# Altium footprint library Connectors.PcbLib: 228 footprints (part 12 of 15)
Each footprint in its own frame and in the unit in brackets; x right, y up, seen from the top. Pads: shape width x height; smd on the part's side, far side on the other; paste and mask are expansions set on the pad; w line width, h text height; cw(c..) or ccw(c..) is an arc to the next point about the centre after c.
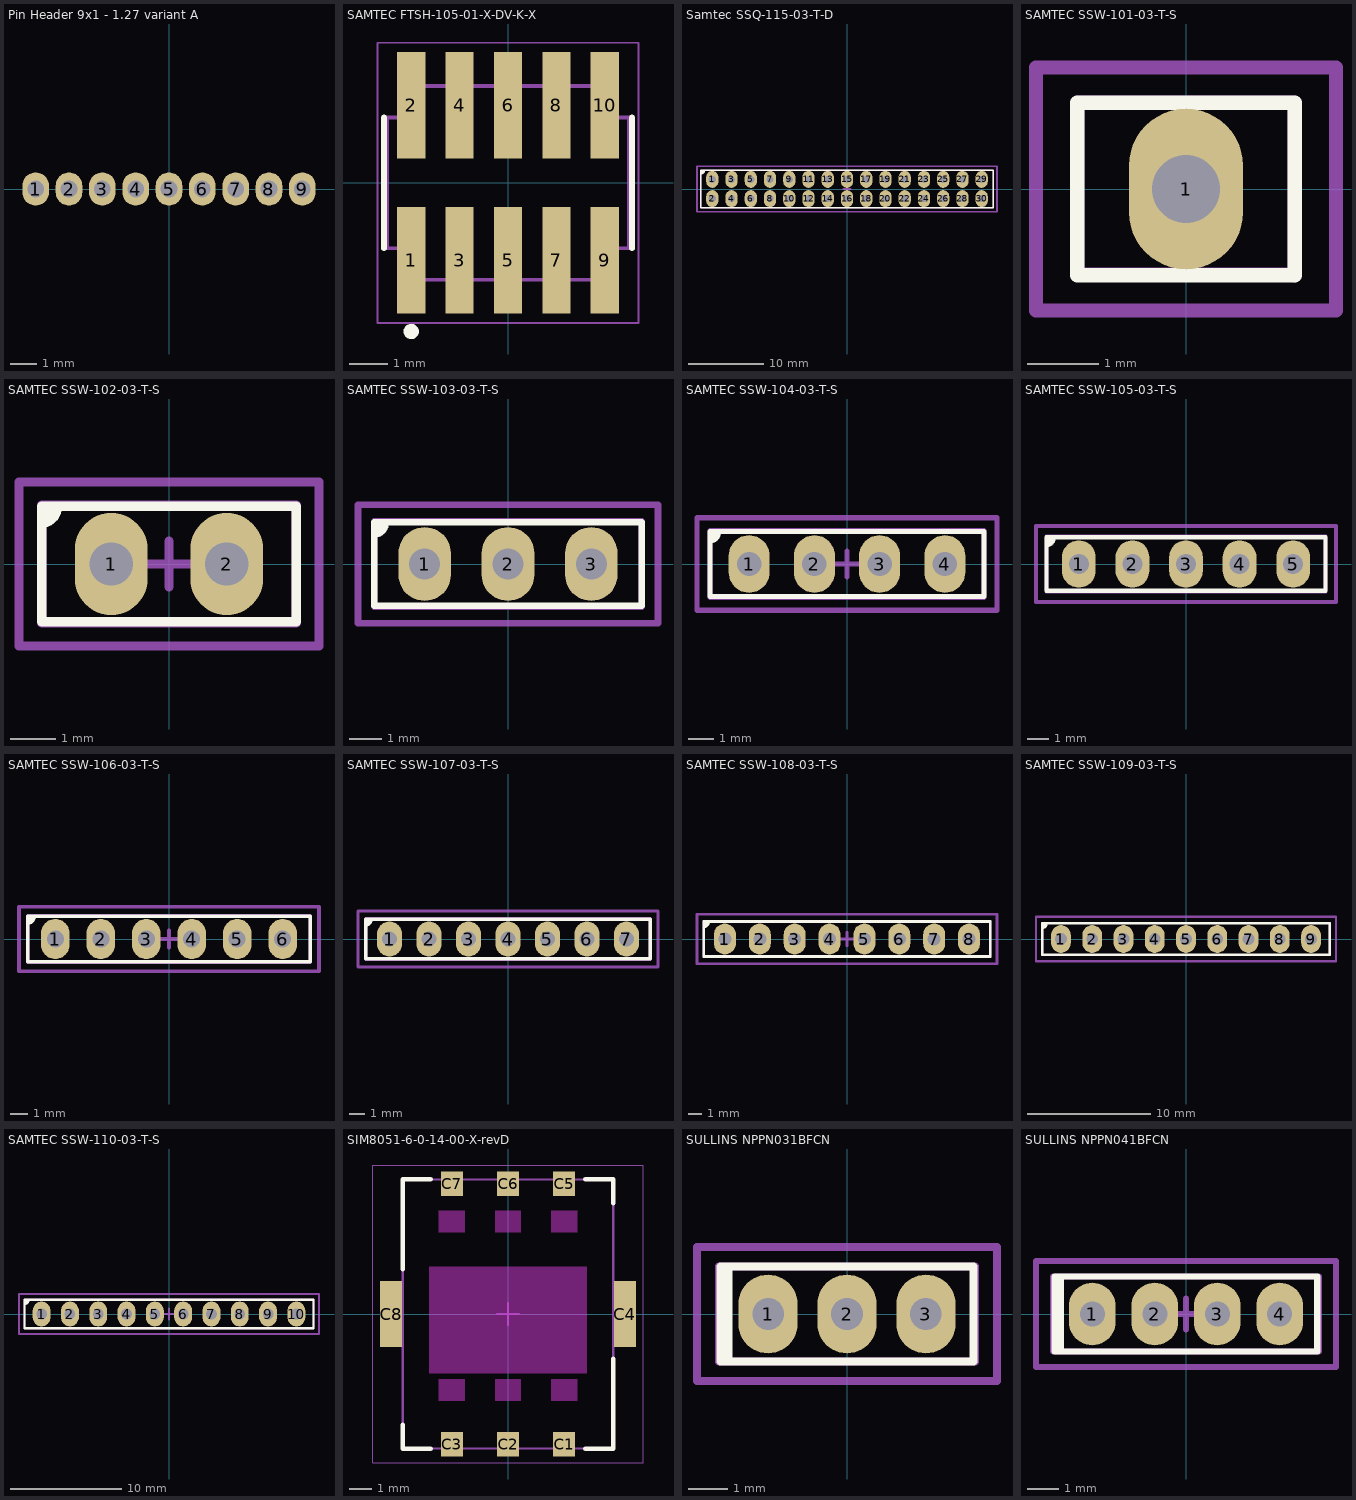
[diagram p11: the footprints below, top view; thin cyan lines are the x and y axes]

## Pin Header 9x1 - 1.27 variant A [mil]
height 425
pads (9):
  oval 40x50 hole 25 mask+0: 1(-200,0) 2(-150,0) 3(-100,0) 4(-50,0) 5(0,0) 6(50,0) 7(100,0) 8(150,0) 9(200,0)
Top Solder:
  circle w17.5: c-200,0 r8.75
  circle w17.5: c-150,0 r8.75
  circle w17.5: c-100,0 r8.75
  circle w17.5: c-50,0 r8.75
  circle w17.5: c0,0 r8.75
  circle w17.5: c50,0 r8.75
  circle w17.5: c100,0 r8.75
  circle w17.5: c150,0 r8.75
  circle w17.5: c200,0 r8.75

## SAMTEC FTSH-105-01-X-DV-K-X [mil]
pads (10):
  rect 29x110 smd paste+0 mask+4.02: 1(-100,-80) 2(-100,80) 3(-50,-80) 4(-50,80) 5(0,-80) 6(0,80) 7(50,-80) 8(50,80) 9(100,-80) 10(100,80)
Top Overlay:
  circle w7.87: c-100,-153.54 r3.94
  lines w5.91: -128.15,-67.5 -128.15,67.5 ; 128.15,-67.5 128.15,67.5
Top Component Outline:
  lines w3.94: -125,-67.5 -100,-67.5 -100,-100 100,-100 100,-67.5 125,-67.5 125,67.5 100,67.5 100,100 -100,100 -100,67.5 -125,67.5 -125,-67.5
Top Courtyard:
  lines w1.97: -134.84,-144.84 -134.84,144.84 134.84,144.84 134.84,-144.84 -134.84,-144.84
3D body "FTSH-105-01-L-DV-K.stp": height 225, standoff -16, extent -124.99,-114.99 125,115

## Samtec SSQ-115-03-T-D [mm]
height 8.51
pads (30):
  oval 1.6x2.25 hole 0.95: 1(-17.78,1.27) 2(-17.78,-1.27) 3(-15.24,1.27) 4(-15.24,-1.27) 5(-12.7,1.27) 6(-12.7,-1.27) 7(-10.16,1.27) 8(-10.16,-1.27) 9(-7.62,1.27) 10(-7.62,-1.27) 11(-5.08,1.27) 12(-5.08,-1.27) 13(-2.54,1.27) 14(-2.54,-1.27) 15(0,1.27) 16(0,-1.27) 17(2.54,1.27) 18(2.54,-1.27) 19(5.08,1.27) 20(5.08,-1.27) 21(7.62,1.27) 22(7.62,-1.27) 23(10.16,1.27) 24(10.16,-1.27) 25(12.7,1.27) 26(12.7,-1.27) 27(15.24,1.27) 28(15.24,-1.27) 29(17.78,1.27) 30(17.78,-1.27)
Top Overlay:
  region: -19.3,2.5 -18.8,2.5 -18.8,2.3 -19.1,2 -19.3,2
  lines w0.2: -19.3,2 ccw(c-19.3,2.5) -18.8,2.5 ; -19.3,-2.5 19.3,-2.5 19.3,2.5 -19.3,2.5 -19.3,-2.5
Top Component Outline:
  lines w0.2: -19.304,-2.476 -19.304,2.477 19.304,2.477 19.304,-2.476 -19.304,-2.476
Top Courtyard:
  lines w0.2: -0.5,0 0.5,0 ; 0,-0.5 0,0.5 ; -19.8,-3 -19.8,3 19.8,3 19.8,-3 -19.8,-3
3D body "Samtec SSQ-115-03-T-D.STEP": height 8.51, standoff -10.01, extent -19.304,-2.476 19.304,2.477

## SAMTEC SSW-101-03-T-S [mm]
height 8.51
pads (1):
  oval 1.6x2.25 hole 0.95: 1(0,0)
Top Overlay:
  lines w0.2: 1.524,-1.2 1.524,-1.206 ; 1.524,-1.206 1.524,1.207 -1.524,1.207 -1.524,-1.206 1.524,-1.206
Top Component Outline:
  lines w0.2: 1.524,-1.206 1.524,1.207 -1.524,1.207 -1.524,-1.2 1.524,-1.2
Top Courtyard:
  lines w0.2: -0.5,0 0.5,0 ; 0,-0.5 0,0.5 ; -2.1,-1.7 -2.1,1.7 2.1,1.7 2.1,-1.7 -2.1,-1.7
3D body "Samtec-SSW-101-03-T-S.STEP": height 8.51, standoff -10.01, extent -1.524,-1.206 1.524,1.207

## SAMTEC SSW-102-03-T-S [mm]
height 8.51
pads (2):
  oval 1.6x2.25 hole 0.95: 1(-1.27,0) 2(1.27,0)
Top Overlay:
  region: -2.8,1.27 -2.46,1.27 -2.46,1.1 -2.66,0.9 -2.8,0.9
  lines w0.2: -2.8,0.9 ccw(c-2.8,1.24) -2.46,1.24 -2.46,1.27 ; -2.8,-1.27 -2.8,1.27 2.8,1.27 2.8,-1.27 -2.8,-1.27
Top Component Outline:
  lines w0.2: -2.8,-1.3 2.8,-1.3 2.8,1.3 -2.8,1.3 -2.8,-1.3
Top Courtyard:
  lines w0.2: -0.5,0 0.5,0 ; 0,-0.5 0,0.5 ; -3.3,-1.8 -3.3,1.8 3.3,1.8 3.3,-1.8 -3.3,-1.8
3D body "Samtec-SSW-102-03-T-S.STEP": height 8.51, standoff -10.01, extent -2.794,-1.206 2.794,1.207

## SAMTEC SSW-103-03-T-S [mm]
height 8.51
pads (3):
  oval 1.6x2.25 hole 0.95: 1(-2.54,0) 2(0,0) 3(2.54,0)
Top Overlay:
  region: -4.07,1.27 -3.73,1.27 -3.73,1.1 -3.93,0.9 -4.07,0.9
  lines w0.2: -4.07,0.9 ccw(c-4.07,1.24) -3.73,1.24 -3.73,1.27 ; -4.07,-1.27 -4.07,1.27 4.07,1.27 4.07,-1.27 -4.07,-1.27
Top Component Outline:
  lines w0.2: -4.07,-1.3 4.07,-1.3 4.07,1.3 -4.07,1.3 -4.07,-1.3
Top Courtyard:
  lines w0.2: -0.5,0 0.5,0 ; 0,-0.5 0,0.5 ; -4.57,-1.8 -4.57,1.8 4.57,1.8 4.57,-1.8 -4.57,-1.8
3D body "Samtec-SSW-103-03-T-S.STEP": height 8.51, standoff -10.01, extent -4.064,-1.206 4.064,1.207

## SAMTEC SSW-104-03-T-S [mm]
height 8.51
pads (4):
  oval 1.6x2.25 hole 0.95: 1(-3.81,0) 2(-1.27,0) 3(1.27,0) 4(3.81,0)
Top Overlay:
  region: -5.34,1.27 -5,1.27 -5,1.1 -5.2,0.9 -5.34,0.9
  lines w0.2: -5.34,0.9 ccw(c-5.34,1.24) -5,1.24 -5,1.27 ; -5.34,-1.27 -5.34,1.27 5.34,1.27 5.34,-1.27 -5.34,-1.27
Top Component Outline:
  lines w0.2: -5.34,-1.3 5.34,-1.3 5.34,1.3 -5.34,1.3 -5.34,-1.3
Top Courtyard:
  lines w0.2: -0.5,0 0.5,0 ; 0,-0.5 0,0.5 ; -5.84,-1.8 -5.84,1.8 5.84,1.8 5.84,-1.8 -5.84,-1.8
3D body "Samtec-SSW-104-03-T-S.STEP": height 8.51, standoff -10.01, extent -5.334,-1.206 5.334,1.207

## SAMTEC SSW-105-03-T-S [mm]
height 8.51
pads (5):
  oval 1.6x2.25 hole 0.95: 1(-5.08,0) 2(-2.54,0) 3(0,0) 4(2.54,0) 5(5.08,0)
Top Overlay:
  region: -6.61,1.27 -6.27,1.27 -6.27,1.1 -6.47,0.9 -6.61,0.9
  lines w0.2: -6.61,0.9 ccw(c-6.61,1.24) -6.27,1.24 -6.27,1.27 ; -6.61,-1.27 6.61,-1.27 6.61,1.27 -6.61,1.27 -6.61,-1.27
Top Component Outline:
  lines w0.2: -6.61,-1.3 -6.61,1.3 6.61,1.3 6.61,-1.3 -6.61,-1.3
Top Courtyard:
  lines w0.2: -0.5,0 0.5,0 ; 0,-0.5 0,0.5 ; -7.11,-1.8 7.11,-1.8 7.11,1.8 -7.11,1.8 -7.11,-1.8
3D body "Samtec-SSW-105-03-T-S.STEP": height 8.51, standoff -10.01, extent -6.604,-1.206 6.604,1.207

## SAMTEC SSW-106-03-T-S [mm]
height 8.51
pads (6):
  oval 1.6x2.25 hole 0.95: 1(-6.35,0) 2(-3.81,0) 3(-1.27,0) 4(1.27,0) 5(3.81,0) 6(6.35,0)
Top Overlay:
  region: -7.88,1.27 -7.54,1.27 -7.54,1.1 -7.74,0.9 -7.88,0.9
  lines w0.2: -7.88,0.9 ccw(c-7.88,1.24) -7.54,1.24 -7.54,1.27 ; -7.88,-1.27 7.88,-1.27 7.88,1.27 -7.88,1.27 -7.88,-1.27
Top Component Outline:
  lines w0.2: -7.88,-1.3 -7.88,1.3 7.88,1.3 7.88,-1.3 -7.88,-1.3
Top Courtyard:
  lines w0.2: -0.5,0 0.5,0 ; 0,-0.5 0,0.5 ; -8.38,-1.8 8.38,-1.8 8.38,1.8 -8.38,1.8 -8.38,-1.8
3D body "Samtec-SSW-106-03-T-S.STEP": height 8.51, standoff -10.01, extent -7.874,-1.206 7.874,1.207

## SAMTEC SSW-107-03-T-S [mm]
height 8.51
pads (7):
  oval 1.6x2.25 hole 0.95: 1(-7.62,0) 2(-5.08,0) 3(-2.54,0) 4(0,0) 5(2.54,0) 6(5.08,0) 7(7.62,0)
Top Overlay:
  region: -9.15,1.27 -8.81,1.27 -8.81,1.1 -9.01,0.9 -9.15,0.9
  lines w0.2: -9.15,0.9 ccw(c-9.15,1.24) -8.81,1.24 -8.81,1.27 ; -9.15,-1.27 9.15,-1.27 9.15,1.27 -9.15,1.27 -9.15,-1.27
Top Component Outline:
  lines w0.2: -9.15,-1.3 -9.15,1.3 9.15,1.3 9.15,-1.3 -9.15,-1.3
Top Courtyard:
  lines w0.2: -0.5,0 0.5,0 ; 0,-0.5 0,0.5 ; -9.65,-1.8 9.65,-1.8 9.65,1.8 -9.65,1.8 -9.65,-1.8
3D body "Samtec-SSW-107-03-T-S.STEP": height 8.51, standoff -10.01, extent -9.144,-1.206 9.144,1.207

## SAMTEC SSW-108-03-T-S [mm]
height 8.51
pads (8):
  oval 1.6x2.25 hole 0.95: 1(-8.89,0) 2(-6.35,0) 3(-3.81,0) 4(-1.27,0) 5(1.27,0) 6(3.81,0) 7(6.35,0) 8(8.89,0)
Top Overlay:
  region: -10.42,1.27 -10.08,1.27 -10.08,1.1 -10.28,0.9 -10.42,0.9
  lines w0.2: -10.42,0.9 ccw(c-10.42,1.24) -10.08,1.24 -10.08,1.27 ; -10.42,-1.27 -10.42,1.27 10.42,1.27 10.42,-1.27 -10.42,-1.27
Top Component Outline:
  lines w0.2: -10.42,-1.3 10.42,-1.3 10.42,1.3 -10.42,1.3 -10.42,-1.3
Top Courtyard:
  lines w0.2: -0.5,0 0.5,0 ; 0,-0.5 0,0.5 ; -10.92,-1.8 -10.92,1.8 10.92,1.8 10.92,-1.8 -10.92,-1.8
3D body "Samtec-SSW-108-03-T-S.STEP": height 8.51, standoff -10.01, extent -10.414,-1.206 10.414,1.207

## SAMTEC SSW-109-03-T-S [mm]
height 8.51
pads (9):
  oval 1.6x2.25 hole 0.95: 1(-10.16,0) 2(-7.62,0) 3(-5.08,0) 4(-2.54,0) 5(0,0) 6(2.54,0) 7(5.08,0) 8(7.62,0) 9(10.16,0)
Top Overlay:
  region: -11.69,1.27 -11.35,1.27 -11.35,1.1 -11.55,0.9 -11.69,0.9
  lines w0.2: -11.69,0.9 ccw(c-11.69,1.24) -11.35,1.24 -11.35,1.27 ; -11.69,-1.27 11.69,-1.27 11.69,1.27 -11.69,1.27 -11.69,-1.27
Top Component Outline:
  lines w0.2: -11.69,-1.3 -11.69,1.3 11.69,1.3 11.69,-1.3 -11.69,-1.3
Top Courtyard:
  lines w0.2: -0.5,0 0.5,0 ; 0,-0.5 0,0.5 ; -12.19,-1.8 12.19,-1.8 12.19,1.8 -12.19,1.8 -12.19,-1.8
3D body "Samtec-SSW-109-03-T-S.STEP": height 8.51, standoff -10.01, extent -11.684,-1.206 11.684,1.207

## SAMTEC SSW-110-03-T-S [mm]
height 8.51
pads (10):
  oval 1.6x2.25 hole 0.95: 1(-11.43,0) 2(-8.89,0) 3(-6.35,0) 4(-3.81,0) 5(-1.27,0) 6(1.27,0) 7(3.81,0) 8(6.35,0) 9(8.89,0) 10(11.43,0)
Top Overlay:
  region: -12.96,1.27 -12.62,1.27 -12.62,1.1 -12.82,0.9 -12.96,0.9
  lines w0.2: -12.96,0.9 ccw(c-12.96,1.24) -12.62,1.24 -12.62,1.27 ; -12.96,-1.27 12.96,-1.27 12.96,1.27 -12.96,1.27 -12.96,-1.27
Top Component Outline:
  lines w0.2: -12.96,-1.3 -12.96,1.3 12.96,1.3 12.96,-1.3 -12.96,-1.3
Top Courtyard:
  lines w0.2: -0.5,0 0.5,0 ; 0,-0.5 0,0.5 ; -13.46,-1.8 13.46,-1.8 13.46,1.8 -13.46,1.8 -13.46,-1.8
3D body "Samtec-SSW-110-03-T-S.STEP": height 8.51, standoff -10.01, extent -12.954,-1.206 12.954,1.207

## SIM8051-6-0-14-00-X-revD [mm] "Nano SIM Card Connector, Push-Pull Type, 6 Pin, SMT, Profile 1.35mm"
height 1.35
pads (8):
  rect 1x1.1 smd: C1(2.54,-5.9) C2(0,-5.9) C3(-2.54,-5.9) C5(2.54,5.9) C6(0,5.9) C7(-2.54,5.9)
  rect 1x3 smd: C4(5.3,0) C8(-5.3,0)
Top Overlay:
  lines w0.2: -4.77,-5.02 -4.77,-6.1 -3.5,-6.1 ; -4.77,2.02 -4.77,6.1 -3.5,6.1 ; 3.5,-6.1 4.77,-6.1 4.77,-2.02 ; 3.5,6.1 4.77,6.1 4.77,5.02
Keep-Out Layer:
  rectangle: -3.575,-2.7 3.575,2.15
  rectangle: -0.6,-3.95 0.6,-2.95
  rectangle: 1.94,-3.95 3.14,-2.95
  rectangle: -3.14,-3.95 -1.94,-2.95
  rectangle: -3.14,3.7 -1.94,4.7
  rectangle: 1.94,3.7 3.14,4.7
  rectangle: -0.6,3.7 0.6,4.7
Top Component Outline:
  lines w0.1: -4.77,-6.1 4.77,-6.1 4.77,6.1 -4.77,6.1 -4.77,-6.1
Top Courtyard:
  lines w0.05: -6.125,-6.75 -6.125,6.75 6.125,6.75 6.125,-6.75 -6.125,-6.75
  lines w0.1: -0.5,0 0.5,0 ; 0,-0.5 0,0.5
3D body "sim8051-6-0-14-00-a_revd.step": height 1.34, standoff -0.01, extent -5.42,-6.1 5.42,6.1

## SULLINS NPPN031BFCN [mm]
height 4.4
pads (3):
  oval 1.5x2 hole 0.8: 1(-2,0) 2(0,0) 3(2,0)
Top Overlay:
  lines w0.2: -3,-1.2 -3,1.2 ; -3.2,-1.2 -3.2,1.2 3.2,1.2 3.2,-1.2 -3.2,-1.2
Board:
  lines w0.2: -3.25,-1.2 -3.25,1.2 3.25,1.2 3.25,-1.2 3.2,-1.2 -3.25,-1.2
Top Courtyard:
  lines w0.2: -0.5,0 0.5,0 ; 0,-0.5 0,0.5 ; -3.8,-1.7 -3.8,1.7 3.8,1.7 3.8,-1.7 -3.8,-1.7
3D body "Sullins NPPN031BFCN-RC.STEP": height 4.41, standoff -2.39, extent -3.25,-1.2 3.25,1.2

## SULLINS NPPN041BFCN [mm]
height 4.4
pads (4):
  oval 1.5x2 hole 0.8: 1(-3,0) 2(-1,0) 3(1,0) 4(3,0)
Top Overlay:
  lines w0.2: -4,-1.2 -4,1.2 ; -4.2,-1.2 4.2,-1.2 4.2,1.2 -4.2,1.2 -4.2,-1.2
Board:
  lines w0.2: 4.25,-1.2 4.25,1.2 -4.25,1.2 -4.25,-1.2 4.25,-1.2
Top Courtyard:
  lines w0.2: -0.5,0 0.5,0 ; 0,-0.5 0,0.5 ; -4.8,-1.7 4.8,-1.7 4.8,1.7 -4.8,1.7 -4.8,-1.7
3D body "Sullins NPPN041BFCN-RC.STEP": height 4.41, standoff -2.39, extent -4.25,-1.2 4.25,1.2